# Altium footprint library JST_4.PcbLib: 1 footprints
Each footprint in its own frame and in the unit in brackets; x right, y up, seen from the top. Pads: shape width x height; smd on the part's side, far side on the other; paste and mask are expansions set on the pad; w line width, h text height; cw(c..) or ccw(c..) is an arc to the next point about the centre after c.
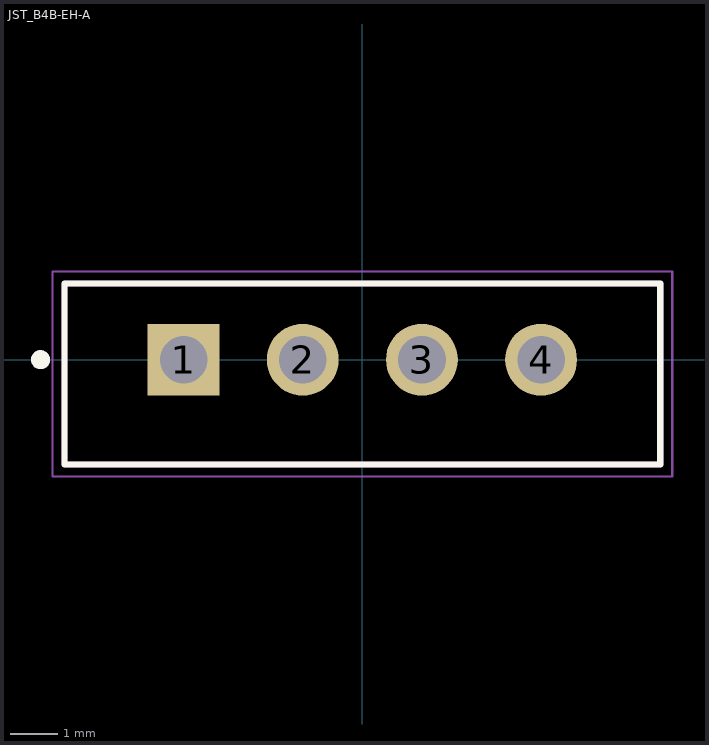
[diagram p0: the footprint, top view; thin cyan lines are the x and y axes]

## JST_B4B-EH-A [mm]
height 6
pads (4):
  rect 1.508x1.508 / inner round 1.508 / far side rect 1.508x1.508 hole 1: 1(-3.75,0)
  round 1.508 hole 1: 2(-1.25,0) 3(1.25,0) 4(3.75,0)
Top Overlay:
  circle w0.2: c-6.75,0 r0.1
  lines w0.127: -6.25,-2.2 6.25,-2.2 6.25,1.6 -6.25,1.6 -6.25,-2.2
Top 3D Body:
  circle w0.2: c-6.75,0 r0.1
  lines w0.127: -6.25,-2.2 6.25,-2.2 6.25,1.6 -6.25,1.6 -6.25,-2.2
Top Courtyard:
  lines w0.05: -6.5,-2.45 6.5,-2.45 6.5,1.85 -6.5,1.85 -6.5,-2.45
Top Designator (Mech29):
  text ".Designator" at 0.333,-4.998 h1
3D body "step_temp.STEP": height 6, standoff -3.2, extent -6.25,-2.2 6.25,1.6